# EAGLE library part M80-6661242 (library M80-6661242)
Datamate L-Tek: 6+6 Pos Plug DIL Right-Angle SMT Connector Latches Gold+Tin Source: Datasheet <https://content.harwin.com/m/6e4b090b866b085f/original/DRG-01687-Technical-Drawing-Datasheet-M80-666-pdf.pdf>
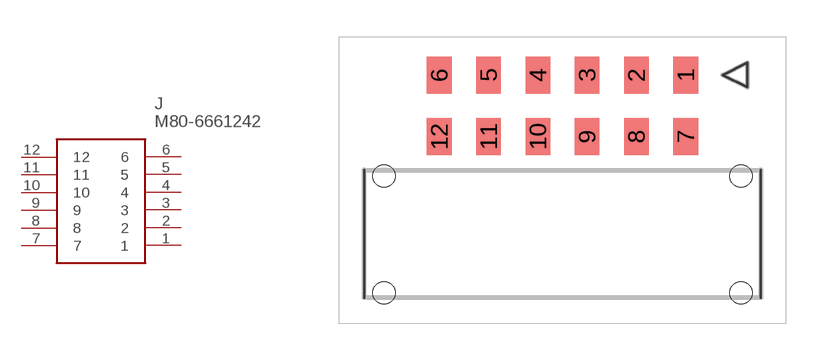
[diagram p0: symbol with the pads of M80-66612YY; footprint M80-66612YY]

Designator prefix J

## M80-6661242 (Description: Datamate L-Tek: 6+6 Pos Plug DIL Right-Angle SMT Connector Latches Gold+Tin; Height: 5.85mm; Manufacturer_Name: Harwin; Manufacturer_Part_Number: M80-6661242; Mouser_Part_Number: 855-M80-6661242; Mouser_Price-Stock: https://www.mouser.co.uk/ProductDetail/Harwin/M80-6661242?qs=IQR8xM2KsGiyO%2F%252ByA7kSvw%3D%3D)  [M80-66612YY]
1  1
2  2
3  3
4  4
5  5
6  6
7  7
8  8
9  9
10  10
11  11
12  12

## Footprint M80-66612YY (pad centres in mm)
M80-66612YY
smd 1 x 1.5: 1 5,1.25; 2 3,1.25; 3 1,1.25; 4 -1,1.25; 5 -3,1.25; 6 -5,1.25; 7 5,-1.25; 8 3,-1.25; 9 1,-1.25; 10 -1,-1.25; 11 -3,-1.25; 12 -5,-1.25
hole 0.9 at 7.25,-2.85
hole 0.9 at -7.25,-2.85
hole 0.9 at 7.25,-7.6
hole 0.9 at -7.25,-7.6